# Altium footprint library custom-case.PcbLib: 342 footprints (part 20 of 22)
Each footprint in its own frame and in the unit in brackets; x right, y up, seen from the top. Pads: shape width x height; smd on the part's side, far side on the other; paste and mask are expansions set on the pad; w line width, h text height; cw(c..) or ccw(c..) is an arc to the next point about the centre after c.
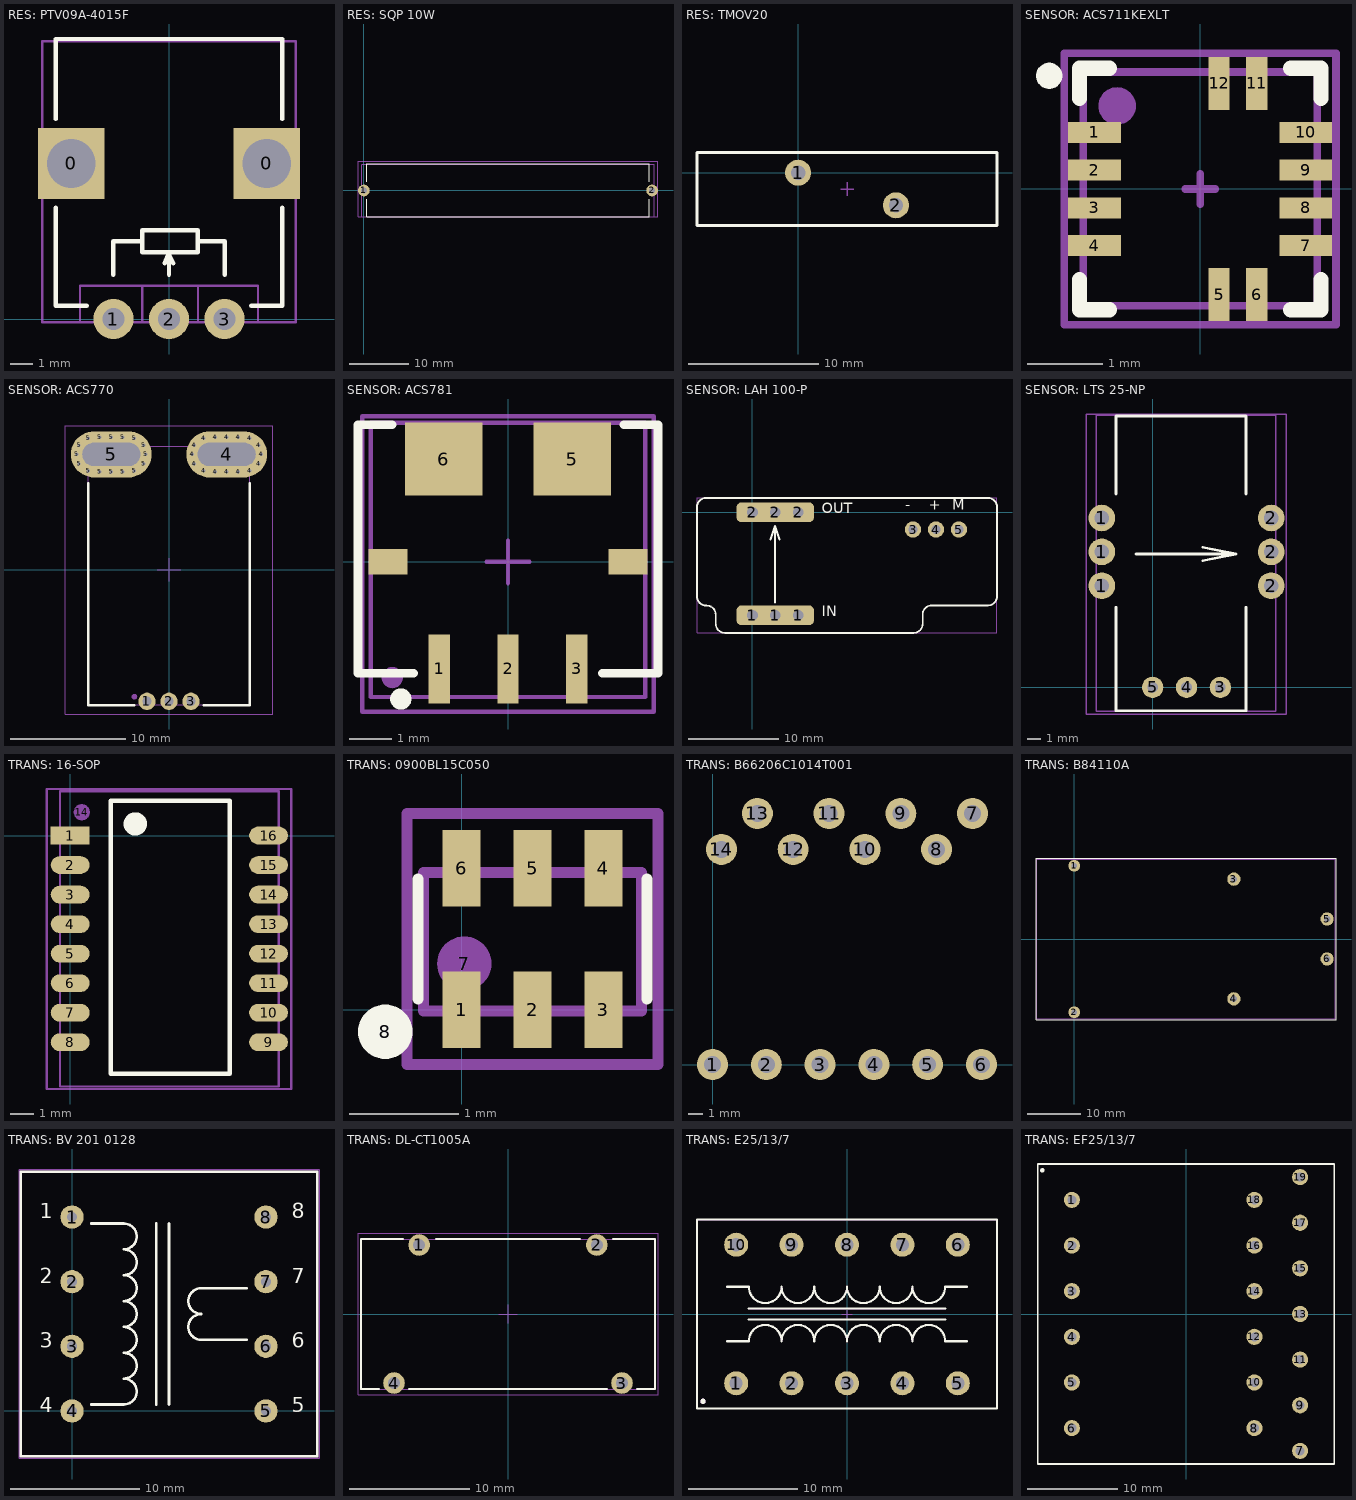
[diagram p19: the footprints below, top view; thin cyan lines are the x and y axes]

## RES: PTV09A-4015F [mm]
pads (5):
  rect 3x3.2 hole 2.2 square: 0(-4.4,7) 0(4.4,7)
  round 1.8 hole 1: 1(-2.5,0) 2(0,0) 3(2.5,0)
Top Overlay:
  lines w0.2: -5.1,5 -5.1,0.6 -3.7,0.6 ; -5.1,9 -5.1,12.6 5.1,12.6 5.1,9 ; -2.5,2 -2.5,3.5 -1.2,3.5 ; -0.2,2.5 0,3 0,2 ; 0,2.9 0.2,2.5 ; 1.3,3.5 2.5,3.5 2.5,2 ; 3.7,0.6 5.1,0.6 5.1,5 ; -1.2,3.5 -1.2,3 1.3,3 1.3,4 -1.2,4 -1.2,3.5
Top Assy:
  lines w0.1: -4,-0.15 -4,1.5 4,1.5 4,-0.15 ; -2.5,2 -2.5,3.5 -1.2,3.5 ; -1.2,-0.15 -1.2,1.5 ; -0.2,2.5 0,3 ; 0,2 0,3 ; 0.2,2.5 0,3 ; 1.3,-0.15 1.3,1.5 ; 1.3,3.5 2.5,3.5 2.5,2 ; -1.2,3.5 -1.2,3 1.3,3 1.3,4 -1.2,4 -1.2,3.5 ; -5.7,-0.15 -5.7,12.5 5.7,12.5 5.7,-0.15 -5.7,-0.15
3D body "6666.STEP": height 15.05, standoff -3.94, extent -5.7,-0.15 5.7,12.5

## RES: SQP 10W [mm]
pads (2):
  round 2 hole 1: 1(0,0) 2(49,0)
Top Overlay:
  lines w0.2: 0.5,-1.5 0.5,-4.5 48.5,-4.5 48.5,-1.5 ; 0.5,1.5 0.5,4.5 48.5,4.5 48.5,1.5
Top Assy:
  lines w0.1: -0.4,4.4 -0.4,-4.5 49.4,-4.5 49.4,4.5 -0.4,4.5
Size Area:
  lines w0.1: -1,-4.5 50,-4.5 50,5 -1,5 -1,-4.5
3D body "User Library-SQP10AJB-1R8.STEP": height 10.55, standoff -4.04, extent -0.4,-4.5 49.4,4.5

## RES: TMOV20 [mm]
pads (2):
  round 2 hole 1.1: 1(0,0) 2(7.5,-2.5)
Top Overlay:
  lines w0.2: -7.75,-4.05 15.246,-4.05 15.246,1.55 -7.75,1.55 -7.75,-4.05
Top Assy:
  lines w0.1: -7.75,-4.05 15.246,-4.05 15.246,1.55 -7.75,1.55 -7.75,-4.05
Size Area:
  lines w0.1: 3.25,-1.25 4.25,-1.25 ; 3.75,-1.75 3.75,-0.75 ; -7.75,-4.05 15.246,-4.05 15.246,1.55 -7.75,1.55 -7.75,-4.05
3D body "User Library-Varistor 20mm.STEP": height 26.7, standoff -2.8, extent -7.75,-4.05 15.246,1.55

## SENSOR: ACS711KEXLT [mm]
pads (14):
  rect 0.7x0.28 smd: 1(-1.4,0.75) 2(-1.4,0.25) 3(-1.4,-0.25) 4(-1.4,-0.75) 7(1.4,-0.75) 8(1.4,-0.25) 9(1.4,0.25) 10(1.4,0.75)
  rect 0.28x0.7 smd: 5(0.25,-1.4) 6(0.75,-1.4) 11(0.75,1.4) 12(0.25,1.4)
  round 0.35 on Top Overlay: ""(-2,1.5)
  round 0.5 on Mech1: ""(-1.1,1.1)
Top Overlay:
  lines w0.2: -1.6,-1.2 -1.6,-1.6 -1.2,-1.6 ; -1.6,1.2 -1.6,1.6 -1.2,1.6 ; 1.2,-1.6 1.6,-1.6 1.6,-1.2 ; 1.2,1.6 1.6,1.6 1.6,1.2
Top Assy:
  lines w0.1: -1.55,-1.55 -1.55,1.55 1.55,1.55 1.55,-1.55 -1.55,-1.55
Size Area:
  lines w0.1: -0.2,0 0.2,0 ; 0,-0.2 0,0.2 ; -1.8,-1.8 1.8,-1.8 1.8,1.8 -1.8,1.8 -1.8,-1.8
3D body "User Library-QFN-16.STEP": height 0.9, standoff 0, extent -1.501,-1.501 1.501,1.501

## SENSOR: ACS770 [mm]
pads (38):
  round 1.5 hole 0.8: 1(-1.91,-11.4) 2(0,-11.4) 3(1.91,-11.4)
  round 0.5 on Mech1: 4(-3,-11)
  round 0.7 hole 0.3: 4(2,10) 4(2.2,9.2) 4(2.2,10.8) 4(3,8.6) 4(3,11.4) 4(4,8.5) 4(4,11.5) 4(5,8.5) 4(5,11.5) 4(6,8.5) 4(6,11.5) 4(7,8.6) 4(7,11.4) 4(7.8,9.2) 4(7.8,10.8) 4(8,10) 5(-8,10) 5(-7.8,9.2) 5(-7.8,10.8) 5(-7,8.6) 5(-7,11.4) 5(-6,8.5) 5(-6,11.5) 5(-5,8.5) 5(-5,11.5) 5(-4,8.5) 5(-4,11.5) 5(-3,8.6) 5(-3,11.4) 5(-2.2,9.2) 5(-2.2,10.8) 5(-2,10)
  oval 7x4 hole 2 slot 5 at 0 deg: 4(5,10) 5(-5,10)
Top Overlay:
  lines w0.2: -7,7.5 -7,-11.75 -3,-11.75 ; 3,-11.75 7,-11.75 7,7.5
Top Assy:
  lines w0.1: -7,-11.705 -7,10.705 7,10.705 7,-11.705 -7,-11.705
Size Area:
  lines w0.1: -1,0 1,0 ; 0,-1 0,1 ; -9,-12.5 -9,12.5 9,12.5 9,-12.5 ; -9,-12.5 9,-12.5 ; -9,-12.5 9,-12.5
3D body "User Library-ACS758xCB-PFF.STEP": height 7.5, standoff -2.98, extent -7,-11.705 7,10.705

## SENSOR: ACS781 [mm]
pads (9):
  rect 0.5x1.6 smd: 1(-1.6,-2.5) 2(0,-2.5) 3(1.6,-2.5)
  rect 1.8x1.7 smd: 5(1.5,2.4) 6(-1.5,2.4)
  rect 0.9x0.6 smd: ""(-2.8,0) ""(2.8,0)
  round 0.5 on Mech1: ""(-2.7,-2.7)
  round 0.5 on Top Overlay: ""(-2.5,-3.2)
Top Overlay:
  lines w0.2: -2.7,3.2 -3.5,3.2 -3.5,-2.6 -2.2,-2.6 ; 2.2,-2.6 3.5,-2.6 3.5,3.2 2.7,3.2
Top Assy:
  lines w0.1: -3.2,-3.154 -3.2,3.246 3.2,3.246 3.2,-3.154 -3.2,-3.154
Size Area:
  lines w0.1: -0.5,0 0.5,0 ; 0,-0.5 0,0.5 ; -3.4,-3.5 3.4,-3.5 3.4,3.4 -3.4,3.4 -3.4,-3.5
3D body "User Library-7-Pin PSOF Package.STEP": height 1.46, standoff -0.02, extent -3.2,-3.154 3.2,3.246

## SENSOR: LAH 100-P [mm]
pads (9):
  rrect50% 3.5x2.2 hole 1.2 square: 1(0,-11.4) 1(2.54,-11.4) 1(5.08,-11.4) 2(0,0) 2(2.54,0) 2(5.08,0)
  round 1.8 hole 1: 3(17.78,-1.905) 4(20.32,-1.905) 5(22.86,-1.905)
Top Overlay:
  lines w0.2: -6.125,0.595 cw(c-5.125,0.595) -5.125,1.595 26.075,1.595 cw(c26.075,0.595) 27.075,0.595 27.075,-9.302 ; -6.125,0.6 -6.125,-9.325 ccw(c-5.125,-9.325) -5.125,-10.325 -5.05,-10.325 cw(c-5.05,-11.325) -4.05,-11.325 -4.05,-12.345 ccw(c-3.05,-12.345) -3.05,-13.345 17.85,-13.345 ccw(c17.85,-12.345) 18.85,-12.345 18.85,-11.3 cw(c19.85,-11.3) 19.85,-10.3 26.075,-10.3 ccw(c26.075,-9.3) 27.075,-9.3 ; 2,-3 2.5,-1.5 ; 2.5,-10 2.5,-1.5 ; 3,-3 2.5,-1.5
  text "IN" at 7.7,-11.9 h2
  text "OUT" at 7.7,-0.5 h2
  text "-" at 16.9,-0.1 h2
  text "+" at 19.5,-0.1 h2
  text "M" at 22.1,-0.1 h2
Top Assy:
  lines w0.1: -6.125,-13.345 -6.125,1.595 27.075,1.595 27.075,-13.345 -6.125,-13.345
Size Area:
  lines w0.1: -6.125,-13.345 -6.125,1.595 27.075,1.595 27.075,-13.345 -6.125,-13.345
3D body "TransCurrent v4.step": height 20.15, standoff -4.45, extent -6.125,-13.345 27.075,1.595

## SENSOR: LTS 25-NP [mm]
pads (9):
  round 2 hole 1.1: 1(-3.81,7.62) 1(-3.81,10.16) 1(-3.81,12.7) 2(8.89,7.62) 2(8.89,10.16) 2(8.89,12.7)
  round 1.6 hole 0.8: 3(5.08,0) 4(2.54,0) 5(0,0)
Top Overlay:
  lines w0.2: -2.75,6 -2.75,-1.75 7,-1.75 7,6 ; -2.75,14.5 -2.75,20.35 7,20.35 7,14.5 ; -1.25,10 6.25,10 ; 3.75,9.5 6.25,10 ; 3.75,10.5 6.25,10
Top Assy:
  lines w0.1: -4.25,-1.8 9.25,-1.8 9.25,20.4 -4.25,20.4 -4.25,-1.8
Size Area:
  lines w0.1: -5,-2 10,-2 10,20.5 -5,20.5 -5,-2
3D body "User Library-LTS6_NP.STEP": height 24, standoff -3.5, extent -4.25,-1.8 9.25,20.4

## TRANS: 16-SOP [mm]
pads (17):
  rect 1.67x0.76 smd: 1(0,0)
  oval 1.67x0.76 smd: 2(0,-1.27) 3(0,-2.54) 4(0,-3.81) 5(0,-5.08) 6(0,-6.35) 7(0,-7.62) 8(0,-8.89) 9(8.53,-8.89) 10(8.53,-7.62) 11(8.53,-6.35) 12(8.53,-5.08) 13(8.53,-3.81) 14(8.53,-2.54) 15(8.53,-1.27) 16(8.53,0)
  round 0.7 on Mech1: 14(0.5,1)
Top Overlay:
  circle w0.6: c2.8,0.5 r0.2
  lines w0.2: 4.583,1.5 6.86,1.5 6.86,-10.25 1.75,-10.25 1.75,1.5 6,1.5
Top Assy:
  lines w0.1: -0.435,-10.795 -0.435,1.905 8.965,1.905 8.965,-10.795 -0.435,-10.795
Size Area:
  lines w0.1: -1,-10.9 9.5,-10.9 9.5,2 -1,2 -1,-10.9
3D body "User Library-smt4.step": height 5.1, standoff 0, extent -0.435,-10.795 8.965,1.905

## TRANS: 0900BL15C050 [mm]
pads (8):
  rect 0.35x0.7 smd: 1(0,0) 2(0.65,0) 3(1.3,0) 4(1.3,1.3) 5(0.65,1.3) 6(0,1.3)
  round 0.5 on Mech1: 7(0.025,0.425)
  round 0.5 on Top Overlay: 8(-0.7,-0.2)
Top Overlay:
  lines w0.1: -0.4,0.1 -0.4,1.2 ; 1.7,0.1 1.7,1.2
Top Assy:
  lines w0.1: -0.35,-0.01 -0.35,1.26 1.65,1.26 1.65,-0.01 -0.35,-0.01
Size Area:
  lines w0.1: -0.5,-0.5 -0.5,1.8 1.8,1.8 1.8,-0.5 -0.5,-0.5
3D body "User Library-1600BL15B100E.STEP": height 0.84, standoff -0.02, extent -0.35,-0.01 1.65,1.26

## TRANS: B66206C1014T001 [mm]
pads (14):
  round 2.2 hole 1.2: 1(0,0) 2(3.81,0) 3(7.62,0) 4(11.43,0) 5(15.24,0) 6(19.05,0) 7(18.415,17.78) 8(15.875,15.24) 9(13.335,17.78) 10(10.795,15.24) 11(8.255,17.78) 12(5.715,15.24) 13(3.175,17.78) 14(0.635,15.24)

## TRANS: B84110A [mm]
pads (6):
  round 2.2 hole 1.1: 1(0,13.75) 2(0,-13.75)
  round 2.5 hole 1.2: 3(30,11.25) 4(30,-11.25) 5(47.5,3.75) 6(47.5,-3.75)
Top Overlay:
  lines w0.2: -7.175,-15.175 49.175,-15.175 49.175,15.175 -7.175,15.175 -7.175,-15.175
Top Assy:
  lines w0.1: 49,15 -7,15 -7,-15 49,-15 49,15 ; 49,15 49,15
Size Area:
  lines w0.1: -7,-15 -7,15 49,15 49,-15 -7,-15
3D body "B84110A.stp": height 23.1, standoff -4, extent -7,-15 49,15

## TRANS: BV 201 0128 [mm]
pads (8):
  round 1.8 hole 0.8: 1(0,15) 2(0,10) 3(0,5) 4(0,0) 5(15,0) 6(15,5) 7(15,10) 8(15,15)
Top Overlay:
  lines w0.2: 1.5,0.5 4,0.5 ccw(c4,1.5) 4,2.5 ccw(c4,3.5) 4,4.5 ccw(c4,5.5) 4,6.5 ccw(c4,7.5) 4,8.5 ccw(c4,9.5) 4,10.5 ccw(c4,11.5) 4,12.5 ccw(c4,13.5) 4,14.5 1.5,14.5 ; 6.5,0.5 6.5,14.5 ; 7.5,0.5 7.5,14.5 ; 13.5,5.5 10,5.5 cw(c10,6.5) 10,7.5 cw(c10,8.5) 10,9.5 13.5,9.5 ; -3.95,-3.5 18.95,-3.5 18.95,18.5 -3.95,18.5 -3.95,-3.5
  text "2" at -2.5,9.5 h2
  text "4" at -2.5,-0.5 h2
  text "1" at -2.5,14.5 h2
  text "3" at -2.5,4.5 h2
  text "7" at 17,9.5 h2
  text "5" at 17,-0.5 h2
  text "8" at 17,14.5 h2
  text "6" at 17,4.5 h2
Top Assy:
  lines w0.1: 1.5,0.5 4,0.5 ccw(c4,1.5) 4,2.5 ccw(c4,3.5) 4,4.5 ccw(c4,5.5) 4,6.5 ccw(c4,7.5) 4,8.5 ccw(c4,9.5) 4,10.5 ccw(c4,11.5) 4,12.5 ccw(c4,13.5) 4,14.5 1.5,14.5 ; 6.5,0.5 6.5,14.5 ; 7.5,0.5 7.5,14.5 ; 13.5,5.5 10,5.5 cw(c10,6.5) 10,7.5 cw(c10,8.5) 10,9.5 13.5,9.5 ; -3.95,-3.5 -3.95,18.5 18.95,18.5 18.95,-3.5 -3.95,-3.5
  text "1" at -2.5,14.5 h2
  text "2" at -2.5,9.5 h2
  text "3" at -2.5,4.5 h2
  text "4" at -2.5,-0.5 h2
  text "5" at 17,-0.5 h2
  text "6" at 17,4.5 h2
  text "7" at 17,9.5 h2
  text "8" at 17,14.5 h2
Size Area:
  lines w0.1: -4.1,-3.65 -4.1,18.65 19.1,18.65 19.1,-3.65 -4.1,-3.65
3D body "BV 201 0128.STEP": height 15, standoff -4, extent -3.95,-3.5 18.95,18.5
3D body: height 11, standoff -11, extent -3.95,18.5 -3.95,18.5
3D body: height 11, standoff -11, extent -3.95,18.5 -3.95,18.5

## TRANS: DL-CT1005A [mm]
pads (4):
  round 1.8 hole 1: 1(-7.4,5.75) 2(7.4,5.75) 3(9.5,-5.75) 4(-9.5,-5.75)
Top Overlay:
  lines w0.2: -10.75,-6.25 -12.25,-6.25 -12.25,6.25 -8.75,6.25 ; -8.25,-6.25 8.25,-6.25 ; -6,6.25 6,6.25 ; 8.75,6.25 12.25,6.25 12.25,-6.25 10.75,-6.25
3D model:
  lines w0.1: -12.25,-6.25 12.25,-6.25 12.25,6.25 -12.25,6.25 -12.25,-6.25
Size Area:
  lines w0.1: -0.75,0 0.75,0 ; 0,-0.75 0,0.75 ; -12.5,-6.75 -12.5,6.75 12.5,6.75 12.5,-6.75 -12.5,-6.75
3D body "DL-CT1005A.STEP": height 25.05, standoff -3.95, extent -12.25,-6.25 12.25,6.25

## TRANS: E25/13/7 [mm]
pads (12):
  round 2.2 hole 1.2: 1(-10.16,-6.35) 2(-5.08,-6.35) 3(0,-6.35) 4(5.08,-6.35) 5(10.16,-6.35) 6(10.16,6.35) 7(5.08,6.35) 8(0,6.35) 9(-5.08,6.35) 10(-10.16,6.35)
  round 0.5 on Mech1: ""(-13.2,-8)
  round 0.5 on Top Overlay: ""(-13.2,-8)
Top Overlay:
  lines w0.2: -11,-2.5 -9,-2.5 cw(c-7.5,-2.5) -6,-2.5 cw(c-4.5,-2.5) -3,-2.5 cw(c-1.5,-2.5) 0,-2.5 cw(c1.5,-2.5) 3,-2.5 cw(c4.5,-2.5) 6,-2.5 cw(c7.5,-2.5) 9,-2.5 11,-2.5 ; -11,2.5 -9,2.5 ccw(c-7.5,2.5) -6,2.5 ccw(c-4.5,2.5) -3,2.5 ccw(c-1.5,2.5) 0,2.5 ccw(c1.5,2.5) 3,2.5 ccw(c4.5,2.5) 6,2.5 ccw(c7.5,2.5) 9,2.5 11,2.5 ; -9,-0.5 9,-0.5 ; -9,0.5 9,0.5 ; -13.75,-8.65 13.75,-8.65 13.75,8.65 -13.75,8.65 -13.75,-8.65
Top Assy:
  lines w0.1: -11,-2.5 -9,-2.5 cw(c-7.5,-2.5) -6,-2.5 cw(c-4.5,-2.5) -3,-2.5 cw(c-1.5,-2.5) 0,-2.5 cw(c1.5,-2.5) 3,-2.5 cw(c4.5,-2.5) 6,-2.5 cw(c7.5,-2.5) 9,-2.5 11,-2.5 ; -11,2.5 -9,2.5 ccw(c-7.5,2.5) -6,2.5 ccw(c-4.5,2.5) -3,2.5 ccw(c-1.5,2.5) 0,2.5 ccw(c1.5,2.5) 3,2.5 ccw(c4.5,2.5) 6,2.5 ccw(c7.5,2.5) 9,2.5 11,2.5 ; -9,-0.5 9,-0.5 ; -9,0.5 9,0.5 ; -13.75,-8.65 13.75,-8.65 13.75,8.65 -13.75,8.65 -13.75,-8.65
Size Area:
  lines w0.1: -0.5,0 0.5,0 ; 0,-0.5 0,0.5 ; -13.75,-8.65 13.75,-8.65 13.75,8.65 -13.75,8.65 -13.75,-8.65
3D body "User Library-E25_13_7vsbore-1.STEP": height 26.85, standoff -3.5, extent -13.75,-8.65 13.75,8.65

## TRANS: EF25/13/7 [mm]
pads (20):
  round 1.8 hole 1: 1(-12.7,12.7) 2(-12.7,7.62) 3(-12.7,2.54) 4(-12.7,-2.54) 5(-12.7,-7.62) 6(-12.7,-12.7) 7(12.7,-15.24) 8(7.62,-12.7) 9(12.7,-10.16) 10(7.62,-7.62) 11(12.7,-5.08) 12(7.62,-2.54) 13(12.7,0) 14(7.62,2.54) 15(12.7,5.08) 16(7.62,7.62) 17(12.7,10.16) 18(7.62,12.7) 19(12.7,15.24)
  round 0.5 on Top Overlay: ""(-16,16)
Top Overlay:
  lines w0.2: -16.5,-16.7 16.5,-16.7 16.5,16.7 -16.5,16.7 -16.5,-16.7
3D body "Transformator 1 v19.step": height 19.95, standoff -3.45, extent -16.5,-16.74 16.55,16.74